# Altium schematic symbol library Ether to laser.SchLib: 21 symbols
Pins are listed as number, name and electrical type; pins without a type are passive.

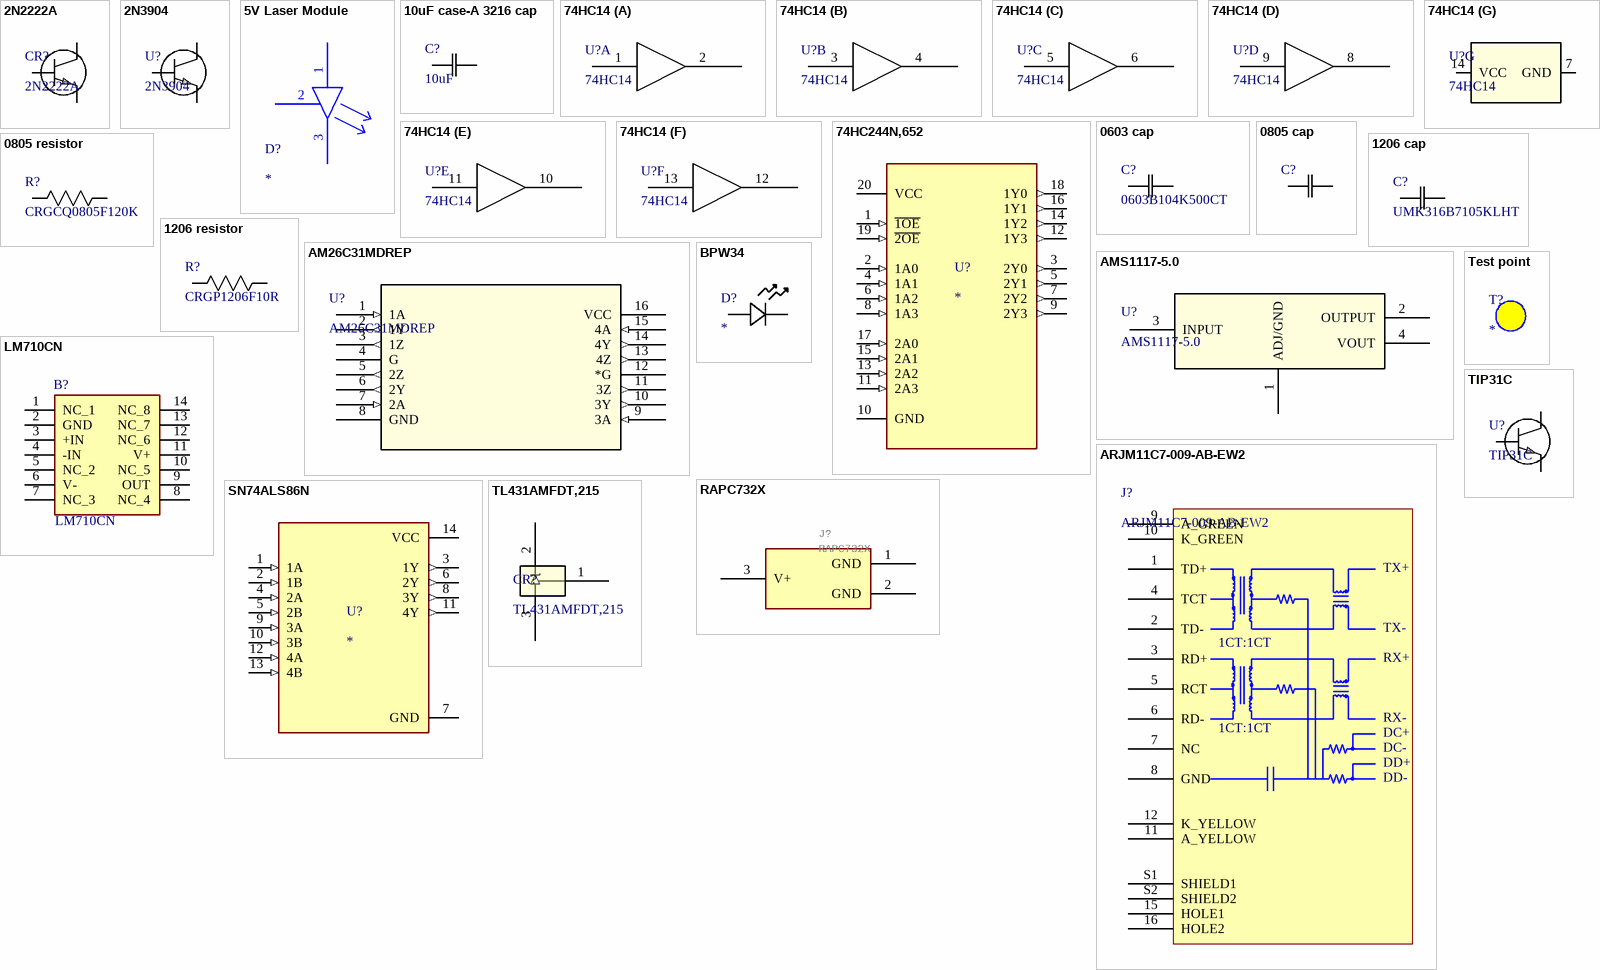
[diagram p0: symbols 2N2222A to TL431AMFDT,215]

## 2N2222A
designator CR?
Description; Manufacturer_Name: STMicroelectronics; Copyright: Copyright (C) 2025 Ultra Librarian. All rights reserved.; Manufacturer_Part_Number: 2N2222A
footprint TO-18_STM
pins: 1 B, 2 C, 3 E

## 2N3904
designator U?
Description; Manufacturer_Name: onsemi; Copyright: Copyright (C) 2025 Ultra Librarian. All rights reserved.; Manufacturer_Part_Number: 2N3904; RefDes: RefDes; Type: Type
footprint TO-92_2
pins: 1 E, 2 B, 3 C

## 5V Laser Module
designator D?
footprint 5V Laser Module
pins: 1 PWR (power), 2 NC (power), 3 GND (power)

## 10uF case-A 3216 cap
designator C?, comment 10uF
Description; Manufacturer_Name: KYOCERA AVX; Manufacturer_Part_Number: TRJA224K035R6000; Copyright: Copyright (C) 2026 Ultra Librarian. All rights reserved.
footprint CAP_TRJ-A-1206_AVX
pins: 1, 2

## 74HC14
designator U?
Description; Manufacturer_Name: Texas Instruments; Copyright: Copyright (C) 2026 Ultra Librarian. All rights reserved.; Manufacturer_Part_Number: 74HC14
footprint 74HC14
part A pins: 1 A, 2 Y
part B pins: 3 A, 4 Y
part C pins: 5 A, 6 Y
part D pins: 8 Y, 9 A
part E pins: 10 Y, 11 A
part F pins: 12 Y, 13 A
part G pins: 7 GND, 14 VCC

## 74HC244N,652
designator U?
Buffer, Non-Inverting 2 Element 4 Bit per Element 3-State Output 20-DIP; MF: NXP USA; MP: 74HC244N,652; SnapEDA_Link: https://www.snapeda.com/parts/74HC244N,652/NXP+Semiconductors/view-part/?ref=snap; Package: DIP-20 NXP Semiconductors; Value: *; Check_prices: https://www.snapeda.com/parts/74HC244N,652/NXP+Semiconductors/view-part/?ref=eda
footprint DIP254P762X420-20
pins: 1 ~{1OE} (in), 2 1A0 (in), 3 2Y0 (out), 4 1A1 (in), 5 2Y1 (out), 6 1A2 (in), 7 2Y2 (out), 8 1A3 (in), 9 2Y3 (out), 10 GND, 11 2A3 (in), 12 1Y3 (out), 13 2A2 (in), 14 1Y2 (out), 15 2A1 (in), 16 1Y1 (out), 17 2A0 (in), 18 1Y0 (out), 19 ~{2OE} (in), 20 VCC (power)

## 0603 cap
designator C?, comment 0603B104K500CT
Description; Manufacturer_Name: Walsin; Copyright: Copyright (C) 2026 Ultra Librarian. All rights reserved.; Manufacturer_Part_Number: 0603B104K500CT
footprint CAP_0603_X_WAL
pins: 1, 2

## 0805 cap
designator C?
Description; Manufacturer_Name: KYOCERA AVX; Manufacturer_Part_Number: 08051A8R2CAT2A; Copyright: Copyright (C) 2026 Ultra Librarian. All rights reserved.
footprint CAP_0805J_AVX
pins: 1, 2

## 0805 resistor
designator R?, comment CRGCQ0805F120K
CRGCQ 0805 120K 1%; Manufacturer_Name: TE Connectivity; Copyright: Copyright (C) 2026 Ultra Librarian. All rights reserved.; Manufacturer_Part_Number: CRGCQ0805F120K
footprint RES_CRGCQ0805_TEC
pins: 1, 2

## 1206 cap
designator C?, comment UMK316B7105KLHT
No Description Available; Manufacturer_Name: TAIYO YUDEN; Copyright: Copyright (C) 2026 Ultra Librarian. All rights reserved.; Manufacturer_Part_Number: UMK316B7105KLHT
footprint CAP_UMK316ABJ475KLHT_TAY
pins: 1, 2

## 1206 resistor
designator R?, comment CRGP1206F10R
CRGP 1206 10R 1%; Manufacturer_Name: TE Connectivity; Type: Chip Resistor - Surface Mount; Copyright: Copyright (C) 2025 Ultra Librarian. All rights reserved.; Manufacturer_Part_Number: CRGP1206F10R
footprint RES_CRGP1206F10R_TEC
pins: 1, 2

## AM26C31MDREP
designator U?
Enhanced Product quadruple differential line driver 16-SOIC -55 to 125; Manufacturer_Name: Texas Instruments; Copyright: Copyright (C) 2025 Ultra Librarian. All rights reserved.; Manufacturer_Part_Number: AM26C31MDREP; RefDes: RefDes; Type: Type
footprint D16
pins: 1 1A (in), 2 1Y (out), 3 1Z (out), 4 G, 5 2Z (out), 6 2Y (out), 7 2A (in), 8 GND (power), 9 3A (in), 10 3Y (out), 11 3Z (out), 12 *G, 13 4Z (out), 14 4Y (out), 15 4A (in), 16 VCC (power)

## AMS1117-5.0
designator U?
Description; Manufacturer_Name: ams OSRAM; Copyright: Copyright (C) 2025 Ultra Librarian. All rights reserved.; Manufacturer_Part_Number: AMS1117-5.0; RefDes: RefDes; Type: Type
footprint SOT_AMS1117-2.5_AMS
pins: 1 ADJ/GND, 2 OUTPUT, 3 INPUT, 4 VOUT

## ARJM11C7-009-AB-EW2
designator J?
Modular Connector, 100 Base-T, RJ45 Jack, 1 x 1 (Port), 8P8C, Through Hole Mount; Manufacturer: Abracon LLC; Inductance: 350µH; Number of Ports: 1; Plating Thickness: 152.4nm; Row Spacing: 2.54mm; Manufacturer Part Number: ARJM11C7-009-AB-EW2; Mounting Type: Through Hole; RoHS: Compliant; Category: Modular / Ethernet Connectors; Stock 1: 4998; Pricing 1: 1=3.05, 10=2.592, 25=2.4292, 50=2.3132, 100=2.2026, 250=2.06468, 500=1.96614, 2000=1.78304, 4000=1.76355 (USD); China RoHS: Compliant; Contact Gender: Female; Contact Plating: Gold; Height: 13.8mm; Length: 21.3mm; Lifecycle Status: Production; Max Operating Temperature: 85°C; Min Operating Temperature: -40°C; Mount: Through Hole; Number of Pins: 8; Number of Rows: 2; REACH SVHC: No; Shell Finish: Nickel; Shell Material: Brass; Terminal Pitch: 2.54mm; Width: 15.9mm; ComponentLink1URL: https://datasheet.octopart.com:443/ARJM11C7-009-AB-EW2-Abracon-datasheet-182207866.pdf?src-supplier=IHS; ComponentLink1Description: https://datasheet.octopart.com:443/ARJM11C7-009-AB-EW2-Abracon-datasheet-182207866.pdf?src-supplier=IHS; ComponentLink2URL: https://datasheet.octopart.com:443/ARJM11C7-009-AB-EW2-Abracon-datasheet-97040553.pdf?src-supplier=Electro+Sonic; ComponentLink2Description: https://datasheet.octopart.com:443/ARJM11C7-009-AB-EW2-Abracon-datasheet-97040553.pdf?src-supplier=Electro+Sonic; ComponentLink3URL: https://datasheet.octopart.com:443/ARJM11C7-009-AB-EW2-Abracon-datasheet-115391515.pdf?src-supplier=Abracon+SCT; ComponentLink3Description: https://datasheet.octopart.com:443/ARJM11C7-009-AB-EW2-Abracon-datasheet-115391515.pdf?src-supplier=Abracon+SCT; ComponentLink4URL: http://sigma.octopart.com:80/conflict_mineral_statement/Abracon-company-27.pdf?src-supplier=Compliance+Statements; ComponentLink4Description: http://sigma.octopart.com:80/conflict_mineral_statement/Abracon-company-27.pdf?src-supplier=Compliance+Statements; Supplier 1: DigiKey; Supplier Part Number 1: 535-14159-ND
footprint ARJM11C7009ABEW2
pins: 1 TD+, 2 TD-, 3 RD+, 4 TCT, 5 RCT, 6 RD-, 7 NC, 8 GND, 9 A_GREEN, 10 K_GREEN, 11 A_YELLOW, 12 K_YELLOW, 15 HOLE1, 16 HOLE2, S1 SHIELD1, S2 SHIELD2
text: TX+; TX-; 1CT:1CT; RX+; RX-; DC+; DC-; DD+; DD-

## BPW34
designator D?
footprint BPW34
pins: 1, 2

## LM710CN
designator B?
Analog Comparators; Manufacturer_Name: Texas Instruments; Geometry.Height: 5.08mm; Manufacturer_Part_Number: LM710CN; Mouser Part Number: N/A; Mouser Price/Stock: https://www.mouser.com/Search/Refine.aspx?Keyword=N%2FA; Arrow Part Number: *; Arrow Price/Stock: *; Datasheet Link: https://pdf1.alldatasheet.com/datasheet-pdf/view/9023/NSC/LM710CN.html
footprint DIP787W58P254L1918H508Q14N
pins: 1 NC_1, 2 GND, 3 +IN, 4 -IN, 5 NC_2, 6 V-, 7 NC_3, 8 NC_4, 9 OUT, 10 NC_5, 11 V+, 12 NC_6, 13 NC_7, 14 NC_8

## RAPC732X
designator J?
Manufacturer_Name: Switchcraft; GateName_1: G$1; SymbolName_1: RAPC732X; LibraryName: RAPC732X; DeviceSetName: RAPC732X; Package: RAPC732X; Manufacturer_Part_Number: RAPC732X; Mouser_Part_Number: 502-RAPC732X; Mouser_Price-Stock: https://www.mouser.co.uk/ProductDetail/Switchcraft/RAPC732X?qs=mcPJWgAPNrf44q5B71nLHg%3D%3D; Arrow_Part_Number: RAPC732X; Arrow_Price-Stock: https://www.arrow.com/en/products/rapc732x/switchcraft?region=nac; Height: 11mm; ComponentLink1Description: Supplier; ComponentLink1URL: https://makerselectronics.com/product/dc-power-jack-female-socket-connector-5-5mmx2-1mm/
footprint RAPC732X
pins: 1 GND (power), 2 GND (power), 3 V+ (power)

## SN74ALS86N
designator U?
4-ch, 2-input, 4.5-V to 5.5-V bipolar XOR (exclusive OR) gates; MF: Texas Instruments; MP: SN74ALS86N; SnapEDA_Link: https://www.snapeda.com/parts/SN74ALS86N/Texas+Instruments/view-part/?ref=snap; Package: PDIP-14 Texas Instruments; Value: *; Check_prices: https://www.snapeda.com/parts/SN74ALS86N/Texas+Instruments/view-part/?ref=eda
footprint DIP794W45P254L1969H508Q14
pins: 1 1A (in), 2 1B (in), 3 1Y (out), 4 2A (in), 5 2B (in), 6 2Y (out), 7 GND (power), 8 3Y (out), 9 3A (in), 10 3B (in), 11 4Y (out), 12 4A (in), 13 4B (in), 14 VCC (power)

## Test point
designator T?
footprint Test point

## TIP31C
designator U?
COMPLEMENTARY SILICON POWER TRANSISTORS; Manufacturer_Name: STMicroelectronics; Copyright: Copyright (C) 2025 Ultra Librarian. All rights reserved.; Manufacturer_Part_Number: TIP31C; ComponentLink1Description: Supplier; ComponentLink1URL: https://microohm-eg.com/tip31c-npn-power-transistor/
footprint TO-220_STM
pins: 1 B, 2 C, 3 E

## TL431AMFDT,215
designator CR?
Description; Manufacturer_Name: Nexperia; Copyright: Copyright (C) 2025 Ultra Librarian. All rights reserved.; Manufacturer_Part_Number: TL431AMFDT,215; RefDes: RefDes; Type: Type
footprint TL431AMFDT,215_NEX
pins: 1, 2, 3